# Altium schematic symbol library 1935200.SchLib: 1 symbol
Pins are listed as number, name and electrical type; pins without a type are passive.

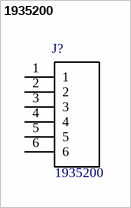
[diagram p0: symbol 1935200]

## 1935200
designator J?
/ 6 Position Wire to Board Terminal Block Horizontal with Board 0.197 _5.00mm_ Through Hole /; MF: Phoenix Contact; Package: None; MP: 1935200; Digi-Key_Purchase_URL: https://www.digikey.com.tr/product-detail/en/phoenix-contact/1935200/277-1581-ND/568618?utm_source=snapeda&utm_medium=aggregator&utm_campaign=symbol; Digi-Key_Part_Number: 277-1581-ND; SnapEDA_Link: https://www.snapeda.com/parts/1935200/Phoenix%20Contact/view-part/2114340/?ref=snap; Value: *
footprint *PHOENIX_1935200
pins: 1, 2, 3, 4, 5, 6